# Altium footprint library FootPrintLib_12.PcbLib: 319 footprints (part 5 of 20)
Each footprint in its own frame and in the unit in brackets; x right, y up, seen from the top. Pads: shape width x height; smd on the part's side, far side on the other; paste and mask are expansions set on the pad; w line width, h text height; cw(c..) or ccw(c..) is an arc to the next point about the centre after c.
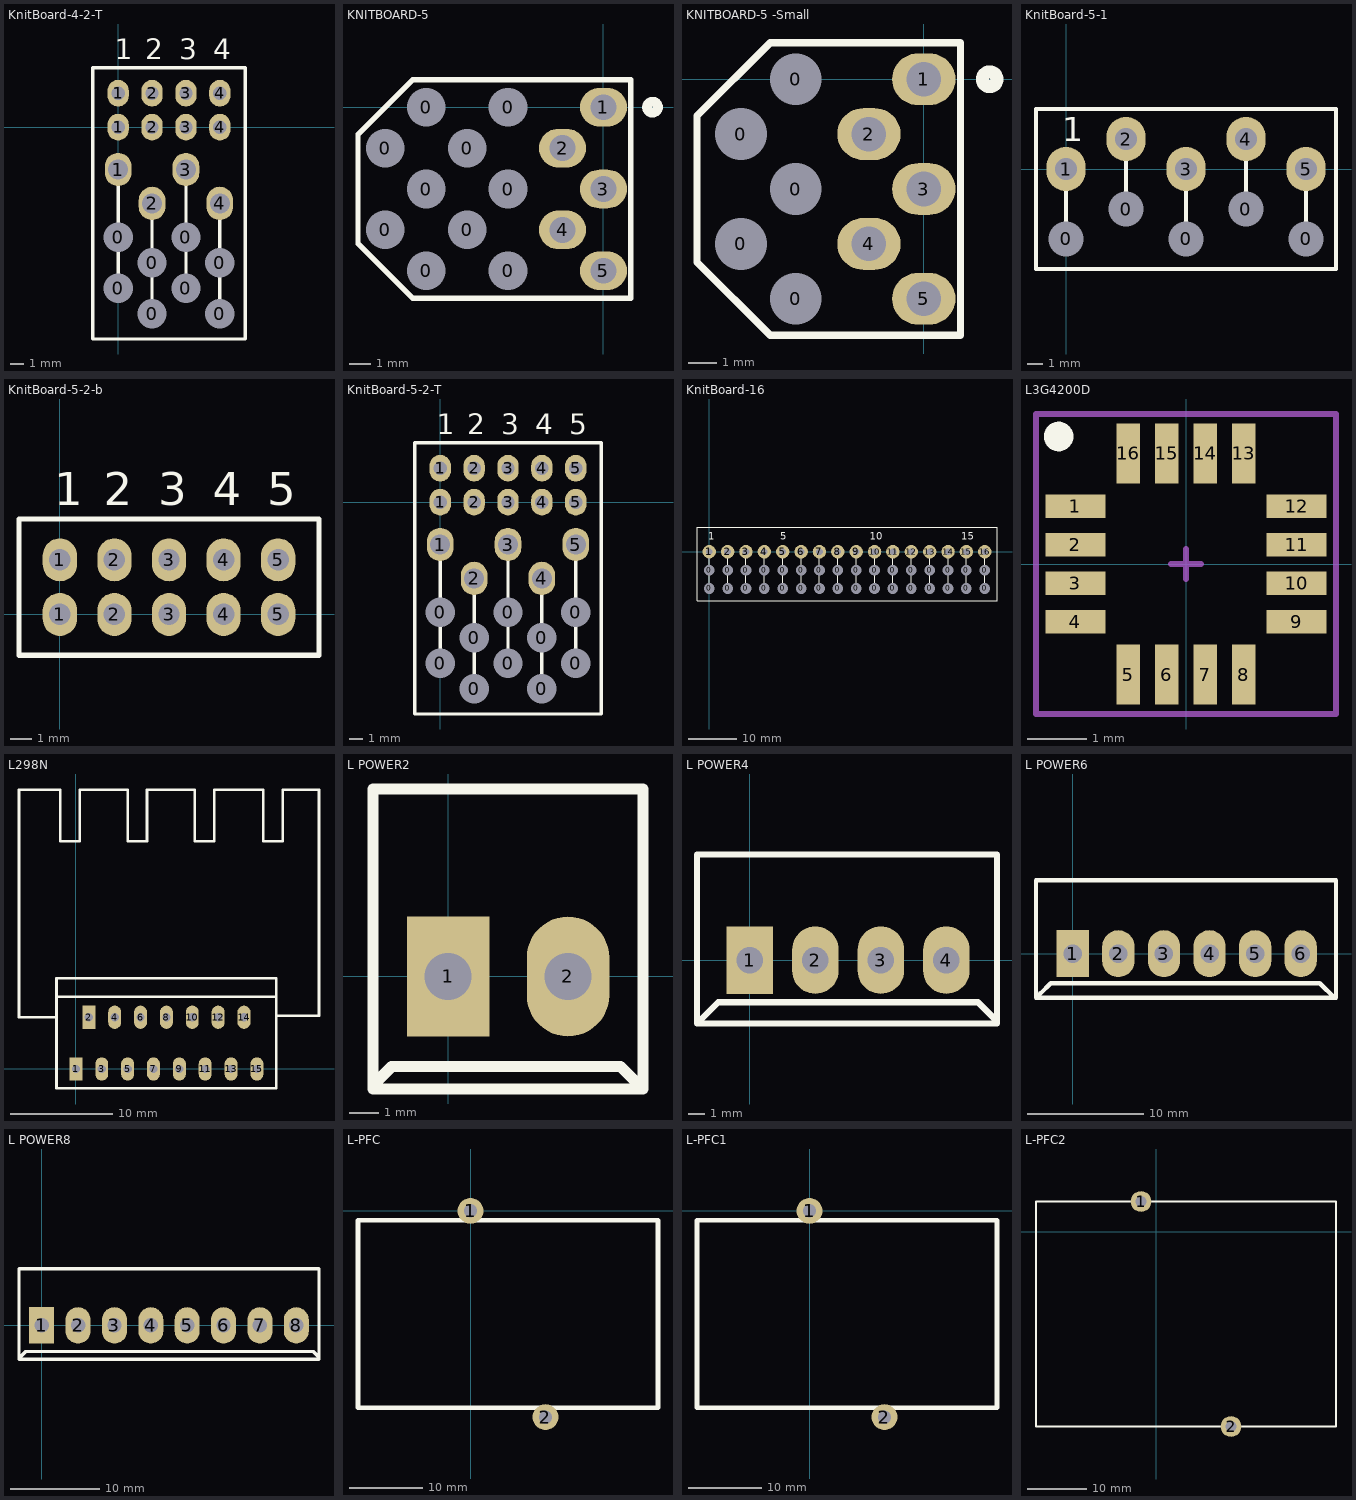
[diagram p4: the footprints below, top view; thin cyan lines are the x and y axes]

## KnitBoard-4-2-T [mm]
pads (20):
  round 2 hole 2.2: 0(0,-12.065) 0(0,-8.255) 0(2.54,-13.97) 0(2.54,-10.16) 0(5.08,-12.065) 0(5.08,-8.255) 0(7.62,-13.97) 0(7.62,-10.16)
  oval 2x2.5 hole 1.5: 1(0,-3.175) 2(2.54,-5.715) 3(5.08,-3.175) 4(7.62,-5.715)
  oval 1.6x2 hole 1: 1(0,0) 1(0,2.54) 2(2.54,0) 2(2.54,2.54) 3(5.08,0) 3(5.08,2.54) 4(7.62,0) 4(7.62,2.54)
Top Overlay:
  lines w0.254: 0,-12.065 0,-3.175 ; 2.54,-13.97 2.54,-5.715 ; 5.08,-12.065 5.08,-3.175 ; 7.62,-13.97 7.62,-5.715 ; -1.905,-15.875 9.525,-15.875 9.525,4.445 -1.905,4.445 -1.905,-15.875
  text "4" at 7.112,5.08 h1.52
  text "3" at 4.572,5.08 h1.52
  text "2" at 2.032,5.08 h1.52
  text "1" at -0.254,5.08 h1.52

## KNITBOARD-5 [mm]
pads (15):
  round 1.5 hole 1.8: 0(-10.16,-5.715) 0(-10.16,-1.905) 0(-8.255,-7.62) 0(-8.255,-3.81) 0(-8.255,0) 0(-6.35,-5.715) 0(-6.35,-1.905) 0(-4.445,-7.62) 0(-4.445,-3.81) 0(-4.445,0)
  oval 2.2x1.8 hole 1.2: 1(0,0) 2(-1.905,-1.905) 3(0,-3.81) 4(-1.905,-5.715) 5(0,-7.62)
Top Overlay:
  circle w0.454: c2.286,0 r0.254
  lines w0.254: -11.43,-6.35 -8.89,-8.89 1.27,-8.89 1.27,1.27 -8.89,1.27 -11.43,-1.27 -11.43,-6.35

## KNITBOARD-5 -Small [mm] "p?"
pads (10):
  round 1.5 hole 1.8: 0(-6.35,-5.715) 0(-6.35,-1.905) 0(-4.445,-7.62) 0(-4.445,-3.81) 0(-4.445,0)
  oval 2.2x1.8 hole 1.2: 1(0,0) 2(-1.905,-1.905) 3(0,-3.81) 4(-1.905,-5.715) 5(0,-7.62)
Top Overlay:
  circle w0.454: c2.286,0 r0.254
  lines w0.254: -7.874,-6.35 -5.334,-8.89 1.27,-8.89 1.27,1.27 -5.334,1.27 -7.874,-1.27 -7.874,-6.35

## KnitBoard-5-1 [mm]
pads (10):
  round 2 hole 2.2: 0(0,-4.445) 0(3.81,-2.54) 0(7.62,-4.445) 0(11.43,-2.54) 0(15.24,-4.445)
  oval 2.5x2.8 hole 1.4: 1(0,0) 2(3.81,1.905) 3(7.62,0) 4(11.43,1.905) 5(15.24,0)
Top Overlay:
  lines w0.254: 0,-4.445 0,0 ; 3.81,-2.54 3.81,1.905 ; 7.62,-4.445 7.62,0 ; 11.43,-2.54 11.43,1.905 ; 15.24,-4.445 15.24,0 ; -1.905,-6.35 17.145,-6.35 17.145,3.81 -1.905,3.81 -1.905,-6.35
  text "1" at -0.254,1.778 h1.52

## KnitBoard-5-2-b [mm]
pads (10):
  oval 1.6x2 hole 1: 1(0,0) 1(0,2.54) 2(2.54,0) 2(2.54,2.54) 3(5.08,0) 3(5.08,2.54) 4(7.62,0) 4(7.62,2.54) 5(10.16,0) 5(10.16,2.54)
Top Overlay:
  lines w0.254: -1.905,-1.905 -1.905,4.445 12.065,4.445 12.065,-1.905 -1.905,-1.905
  text "5" at 9.652,5.08 h1.52
  text "1" at -0.254,5.08 h1.52
  text "2" at 2.032,5.08 h1.52
  text "3" at 4.572,5.08 h1.52
  text "4" at 7.112,5.08 h1.52

## KnitBoard-5-2-T [mm]
pads (25):
  round 2 hole 2.2: 0(0,-12.065) 0(0,-8.255) 0(2.54,-13.97) 0(2.54,-10.16) 0(5.08,-12.065) 0(5.08,-8.255) 0(7.62,-13.97) 0(7.62,-10.16) 0(10.16,-12.065) 0(10.16,-8.255)
  oval 2x2.5 hole 1.5: 1(0,-3.175) 2(2.54,-5.715) 3(5.08,-3.175) 4(7.62,-5.715) 5(10.16,-3.175)
  oval 1.6x2 hole 1: 1(0,0) 1(0,2.54) 2(2.54,0) 2(2.54,2.54) 3(5.08,0) 3(5.08,2.54) 4(7.62,0) 4(7.62,2.54) 5(10.16,0) 5(10.16,2.54)
Top Overlay:
  lines w0.254: 0,-12.065 0,-3.175 ; 2.54,-13.97 2.54,-5.715 ; 5.08,-12.065 5.08,-3.175 ; 7.62,-13.97 7.62,-5.715 ; 10.16,-12.065 10.16,-3.175 ; -1.905,-15.875 -1.905,4.445 12.065,4.445 12.065,-15.875 -1.905,-15.875
  text "5" at 9.652,5.08 h1.52
  text "1" at -0.254,5.08 h1.52
  text "2" at 2.032,5.08 h1.52
  text "3" at 4.572,5.08 h1.52
  text "4" at 7.112,5.08 h1.52

## KnitBoard-16 [mm]
pads (48):
  round 2 hole 2.2: 0(0,-7.62) 0(0,-3.81) 0(3.81,-7.62) 0(3.81,-3.81) 0(7.62,-7.62) 0(7.62,-3.81) 0(11.43,-7.62) 0(11.43,-3.81) 0(15.24,-7.62) 0(15.24,-3.81) 0(19.05,-7.62) 0(19.05,-3.81) 0(22.86,-7.62) 0(22.86,-3.81) 0(26.67,-7.62) 0(26.67,-3.81) 0(30.48,-7.62) 0(30.48,-3.81) 0(34.29,-7.62) 0(34.29,-3.81) 0(38.1,-7.62) 0(38.1,-3.81) 0(41.91,-7.62) 0(41.91,-3.81) 0(45.72,-7.62) 0(45.72,-3.81) 0(49.53,-7.62) 0(49.53,-3.81) 0(53.34,-7.62) 0(53.34,-3.81) 0(57.15,-7.62) 0(57.15,-3.81)
  round 2.794 hole 1.397: 1(0,0) 2(3.81,0) 3(7.62,0) 4(11.43,0) 5(15.24,0) 6(19.05,0) 7(22.86,0) 8(26.67,0) 9(30.48,0) 10(34.29,0) 11(38.1,0) 12(41.91,0) 13(45.72,0) 14(49.53,0) 15(53.34,0) 16(57.15,0)
Top Overlay:
  lines w0.254: 0,-7.62 0,0 ; 3.81,-7.62 3.81,0 ; 7.62,-7.62 7.62,0 ; 11.43,-7.62 11.43,0 ; 15.24,-7.62 15.24,0 ; 19.05,-7.62 19.05,0 ; 22.86,-7.62 22.86,0 ; 26.67,-7.62 26.67,0 ; 30.48,-7.62 30.48,0 ; 34.29,-7.62 34.29,0 ; 38.1,-7.62 38.1,0 ; 41.91,-7.62 41.91,0 ; 45.72,-7.62 45.72,0 ; 49.53,-7.62 49.53,0 ; 53.34,-7.62 53.34,0 ; 57.15,-7.62 57.15,0 ; -2.54,-10.16 59.69,-10.16 59.69,5.08 -2.54,5.08 -2.54,-10.16
  text "15" at 52.324,2.54 h1.52
  text "10" at 33.274,2.54 h1.52
  text "5" at 14.732,2.54 h1.52
  text "1" at -0.254,2.54 h1.52

## L3G4200D [mm] "L3G4200D MEMS motion sensor:  ultra-stable three-axis digital output gyroscope"
height 1.1
pads (16):
  rect 1.02x0.4 smd: 1(-1.873,0.975) 2(-1.873,0.325) 3(-1.873,-0.325) 4(-1.873,-0.975) 9(1.873,-0.975) 10(1.873,-0.325) 11(1.873,0.325) 12(1.873,0.975)
  rect 0.4x1.02 smd: 5(-0.975,-1.873) 6(-0.325,-1.873) 7(0.325,-1.873) 8(0.975,-1.873) 13(0.975,1.873) 14(0.325,1.873) 15(-0.325,1.873) 16(-0.975,1.873)
Top Overlay:
  circle w0.25: c-2.157,2.159 r0.125
Mechanical 15:
  lines w0.1: -0.254,0 0.254,0 ; 0,-0.254 0,0.254 ; -2.54,-2.54 -2.54,2.54 2.54,2.54 2.54,-2.54 -2.54,-2.54
3D body "User Library-L3G4200D-1.step": height 1.11, standoff -0.01, extent -2.007,-2 1.993,2

## L298N [mil] "L298N"
pads (15):
  rect 50x90 hole 32: 1(0,0) 2(50,200)
  oval 50x90 hole 32: 3(100,0) 4(150,200) 5(200,0) 6(250,200) 7(300,0) 8(350,200) 9(400,0) 10(450,200) 11(500,0) 12(550,200) 13(600,0) 14(650,200) 15(700,0)
Top Overlay:
  lines w10: -75,200 -220,200 -220,1080 -60,1080 -60,880 15,880 15,1080 200,1080 200,880 275,880 275,1080 460,1080 460,880 535,880 535,1080 720,1080 ; -75,280 775,280 ; 725,1080 725,880 800,880 800,1080 940,1080 ; 775,195 775,205 940,205 940,1080 ; 935,1080 940,1080 ; -75,-75 775,-75 775,350 -75,350 -75,250 -75,-75

## L POWER2 [mil]
pads (2):
  rect 110x160 hole 63: 1(0,0)
  oval 110x160 hole 63: 2(160,0)
Top Overlay:
  lines w15: -100,-150 -100,-145 -75,-120 230,-120 260,-150 ; -100,-150 -100,50 -100,250 260,250 260,-150 ; -100,-150 260,-150

## L POWER4 [mil]
pads (4):
  rect 110x160 hole 63: 1(0,0)
  oval 110x160 hole 63: 2(155,0) 3(310,0) 4(465,0)
Top Overlay:
  lines w15: -110,-150 -115,-150 ; 585,-145 540,-100 -75,-100 -110,-135 -125,-150 ; -125,-150 -115,-150 ; -125,-150 -125,250 585,250 585,-150 -115,-150

## L POWER6 [mil]
pads (6):
  rect 110x160 hole 63: 1(0,0)
  oval 110x160 hole 63: 2(155,0) 3(310,0) 4(465,0) 5(620,0) 6(775,0)
Top Overlay:
  lines w15: -110,-150 -115,-150 ; 890,-150 840,-100 -75,-100 -110,-135 -125,-150 ; -125,-150 -125,250 895,250 895,-150 -115,-150 ; -125,-150 -115,-150

## L POWER8 [mil]
pads (8):
  rect 110x160 hole 63: 1(0,0)
  oval 110x160 hole 63: 2(160,0) 3(320,0) 4(480,0) 5(640,0) 6(800,0) 7(960,0) 8(1120,0)
Top Overlay:
  lines w15: 1220,-140 1195,-115 -70,-115 -100,-145 -100,-150 ; -100,-150 1220,-150 1220,250 -100,250 -100,50 -100,-150

## L-PFC [mm]
pads (2):
  round 3.5 hole 1.8: 1(0,0) 2(10.16,-27.94)
Top Overlay:
  lines w0.635: -15.24,-26.67 25.4,-26.67 25.4,-1.27 -15.24,-1.27 -15.24,-26.67

## L-PFC1 [mm]
pads (2):
  round 3.5 hole 1.8: 1(0,0) 2(10.16,-27.94)
Top Overlay:
  lines w0.635: -15.24,-26.67 25.4,-26.67 25.4,-1.27 -15.24,-1.27 -15.24,-26.67

## L-PFC2 [mm]
pads (2):
  round 3.5 hole 1.8: 1(-2.54,5.08) 2(12.7,-33.02)
Top Overlay:
  lines w0.381: -20.32,-33.02 -20.32,5.08 30.48,5.08 30.48,-33.02 -20.32,-33.02